# Altium footprint library TPS63802DLAR.PcbLib: 1 footprints
Each footprint in its own frame and in the unit in brackets; x right, y up, seen from the top. Pads: shape width x height; smd on the part's side, far side on the other; paste and mask are expansions set on the pad; w line width, h text height; cw(c..) or ccw(c..) is an arc to the next point about the centre after c.
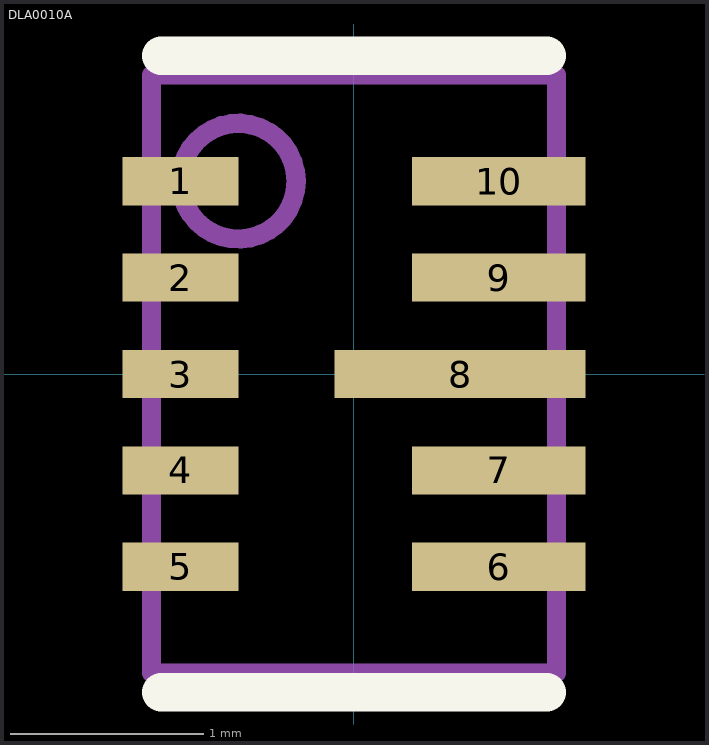
[diagram p0: the footprint, top view; thin cyan lines are the x and y axes]

## DLA0010A [mm]
pads (10):
  rect 0.6x0.25 smd paste+0 mask+0: 1(-0.9,1) 2(-0.9,0.5) 3(-0.9,0) 4(-0.9,-0.5) 5(-0.9,-1)
  rect 0.9x0.25 smd paste+0 mask+0: 6(0.75,-1) 7(0.75,-0.5) 9(0.75,0.5) 10(0.75,1)
  rect 1.3x0.25 smd paste-0.637 mask+0: 8(0.55,0)
Top Overlay:
  lines w0.2: -1,-1.65 1,-1.65 ; -1,1.65 1,1.65
Top Paste:
  region: 0.7,-0.125 0.65,-0.075 0.65,0.075 0.7,0.125 1.15,0.125 1.2,0.075 1.2,-0.075 1.15,-0.125
  region: -0.05,-0.125 -0.1,-0.075 -0.1,0.075 -0.05,0.125 0.4,0.125 0.45,0.075 0.45,-0.075 0.4,-0.125
Mechanical 13:
  circle w0.1: c-0.6,1 r0.3
  lines w0.1: -1.05,-1.55 -1.05,1.55 1.05,1.55 1.05,-1.55 -1.05,-1.55
3D body "TPS63802DLAR.stp": height 0.97, standoff -0.03, extent -1.05,-1.55 1.05,1.55